# Altium schematic symbol library Inductor.SchLib: 46 symbols
Pins are listed as number, name and electrical type; pins without a type are passive.

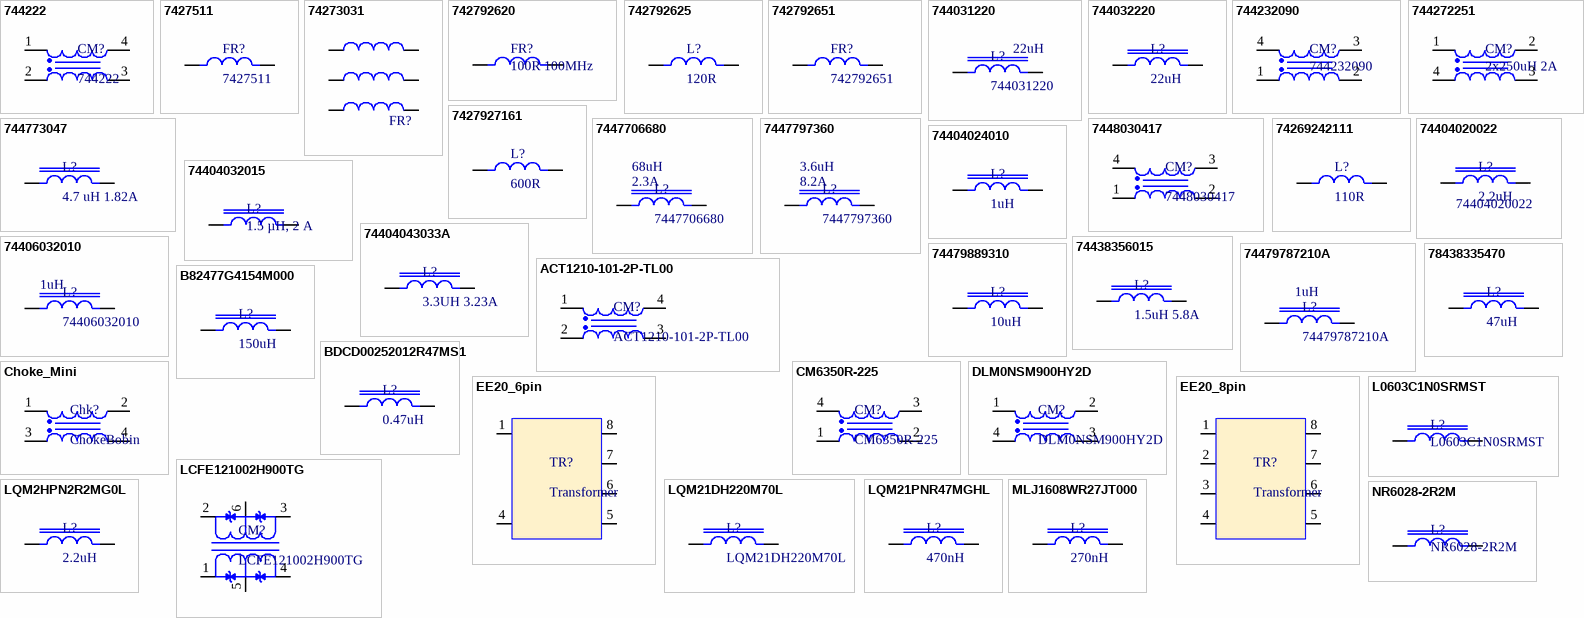
[diagram p0: symbols 744222 to NR6028-2R2M]

## 744222
designator CM?
Common Mode Chokes Dual 1000uH 6kOhm 100kHz 0.8A 0.207Ohm DCR SMD T/R Automotive AEC-Q200; Manufacturer: Wurth Elektronik; Current Rating: 800mA; DC Resistance (DCR): 310mΩ; Impedance: 6kΩ; Value: 1mH; Inductance Tolerance: 50%; Purpose Of Usage: BASIC; Shielding: Shielded; Manufacturer Part Number: 744222; RoHS: YES; Category: INDUCTORS; Ambient Temperature Range High: 85°C; Ambient Temperature Range Low: -40°C; Case/Package: SMD/SMT; Height: 5mm; Length: 9.2mm; Max DC Current: 800mA; Max Operating Temperature: 125°C; Min Operating Temperature: -40°C; Test Frequency: 100kHz; Mount: SMD; Stock ID: ??; Sub-Category: COMMON MODE CHOKES; Supplier 1: Digi-Key; Supplier Part Number 1: 732-1485-1-ND
footprint WE-SL2_74422 (SMD Inductor, Body 8.7x10mm)
pins: 1, 2, 3, 4

## 7427511
designator FR?
WE-SUKW SMT EMI SUPPRESSION 5-HOLE FERRITE BEAD Ferrite Bead, 3 Function(s), 5A, 2 Pin(s); Manufacturer: Wurth Electronics; Impedance: 416R; Max DC Current: 9A; Shielding: Unshielded; Test Frequency: 100MHz; DC Resistance (DCR): 1.1mR; Inductance Tolerance: 25%; Purpose Of Usage: BASIC; Manufacturer Part Number: 7427511; RoHS: YES; Category: INDUCTORS; Case/Package: 2220; Material: Steel; Min Operating Temperature: -55°C; Max Operating Temperature: 125°C; Max Current Rating: 5A; Series: WE-SUKW; Length: 4.6MM; Height: 4.6mm; Current Rating: 9A; Mount: SMD; MSL: 1; Resistor Type: Wirewound; Stock ID: ??; Sub-Category: FERRITE BEADS; Supplier 1: Digi-Key; Supplier Part Number 1: 732-2375-2-ND
footprint 7427511
pins: 1, 2

## 74273031
designator FR?, comment 264Ohm  (value not drawn)
WE-MLS Multiline EMI Suppression Ferrite, 3 Lines, 264Ohm, 4A; Manufacturer Part Number: 74273031; Manufacturer: Wurth Elektronik; DC Resistance (DCR): 2mR; Purpose Of Usage: BASIC; Inductance Tolerance: 20%; Category: INDUCTORS; Mount: THT; Length: 7.62mm; Height: 11.2mm; Case/Package: THT; Current Rating: 4A; Max DC Current: 4A; Max Operating Temperature: 125°C; Min Operating Temperature: -40°C; Resistor Type: Wirewound; RoHS: YES; Stock ID: ??; Sub-Category: FERRITE BEADS; Supplier 1: Digi-Key; Supplier Part Number 1: 732-74273031-ND
footprint 74273031 (THT Multiline EMI Suppression Ferrite, body 7.62x5.08mm)
pins: 1, 2, 3, 4, 5, 6

## 742792620
designator FR?, comment 100R 100MHz
100Ohm 100MHz 500mA 0603 SMD; Manufacturer: Wurth Electronics; Manufacturer Part Number: 742792620; DC Resistance (DCR): 150mR; Inductance Tolerance: 25%; Purpose Of Usage: BASIC; Supplier 1: Digi-Key; Supplier Part Number 1: 732-1579-1-ND; RoHS: YES; Mount: SMD; Case/Package: SMD/SMT; Min Operating Temperature: -55°C; Max Operating Temperature: 125°C; Current Rating: 500mA; Length: 1.6mm; Category: INDUCTORS; Sub-Category: FERRITE BEADS; Stock ID: ??
pins: 1, 2

## 742792625
designator L?, comment 120R
Ferrite Beads Multi-Layer 120Ohm 25% 100MHz 2A 50mOhm DCR 0603 T/R; Manufacturer: Wurth Electronics; Manufacturer Part Number: 742792625; Test Frequency: 400MHz; DC Resistance (DCR): 50mR; Purpose Of Usage: BASIC; Supplier 1: Digi-Key; RoHS: YES; Category: INDUCTORS; Stock 1: 126400; Case/Package: SMD/SMT; Material: Ferrite; Min Operating Temperature: -55°C; Max Operating Temperature: 125°C; Impedance: 120R; Max Current Rating: 2A; Max DC Current: 2A; Series: WE-CBF; Length: 1.6mm; Supplier Part Number 1: 732-4665-2-ND; Current Rating: 2A; Mount: SMD; Stock ID: ??; Sub-Category: FERRITE BEADS; Inductance Tolerance: 25%
footprint L0603
pins: 1, 2

## 742792651
designator FR?
Ferrite Beads WE-CBF 0603 SMD Bead 100MHz 600Ohm 1000mA; Manufacturer: Wurth Electronics; Current Rating: 1A; DC Resistance (DCR): 200mR; Value: 0.36H; Shielding: Unshielded; Purpose Of Usage: BASIC; Inductance Tolerance: 25%; Supplier 1: Digi-Key; Manufacturer Part Number: 742792651; RoHS: YES; Category: INDUCTORS; Stock 1: 668570; Case/Package: 0603; Min Operating Temperature: -55°C; Max Operating Temperature: 125°C; Max DC Current: 1A; Test Frequency: 100MHz; Series: WE-CBF; Length: 1.6mm; Supplier Part Number 1: 732-1593-2-ND; Mount: SMD; Stock ID: ??; Sub-Category: FERRITE BEADS
footprint L0603
pins: 1, 2

## 744031220
designator L?  value 22uH
Power Choke Shielded Wirewound 22uH 30% 100KHz Ferrite 510mA 450mOhm DCR T/R; Manufacturer: Wurth Electronics; DC Resistance (DCR): 450mR; Purpose Of Usage: BASIC; Supplier 1: Digi-Key; Manufacturer Part Number: 744031220; RoHS: YES; Category: INDUCTORS; Case/Package: 3816; Min Operating Temperature: -40°C; Max Operating Temperature: 125°C; Inductance Tolerance: 30%; Current Rating: 510mA; Shielding: Shielded; Length: 3.8mm; Supplier Part Number 1: 732-1012-2-ND; Stock ID: ??; Sub-Category: FIXED INDUCTORS; Mount: SMD; Local Supplier: Würth; Price 10K: 0.18
footprint WE-TPC_3816 (Power Inductor, SMD, 2-Leads, body 3.8x3.8mm)
pins: 1, 2

## 744032220
designator L?, comment 22uH
General Purpose Inductor, 22uH, 10%, 1 Element, Ferrite-Core, SMD, 1210; Manufacturer: Wurth Electronics; Manufacturer Part Number: 744032220; Purpose Of Usage: BASIC; RoHS: YES; Category: INDUCTORS; Case/Package: 1210; Local Supplier: Würth; Max Operating Temperature: 125°C; Min Operating Temperature: -40°C; Mount: SMD; Price 10K: 0.18; Stock ID: ??; Sub-Category: FIXED INDUCTORS; Supplier 1: Digi-Key; Supplier Part Number 1: 732-3058-1-ND; Value: 22uH
footprint WE-LQ_1210 (SMT Inductor, body 3.2x2.5mm)
pins: 1, 2

## 744232090
designator CM?
Common Mode Chokes Dual 90Ohm 100MHz 370mA SMD T/R; Manufacturer: Wurth Electronics; Value: 3.3H; DC Resistance (DCR): 300mR; Inductance Tolerance: 25%; Purpose Of Usage: BASIC; Supplier 1: Digi-Key; Supplier Part Number 1: 732-1469-1-ND; Manufacturer Part Number: 744232090; RoHS: YES; Mount: SMD; Case/Package: SMD/SMT; Min Operating Temperature: -40°C; Max Operating Temperature: 125°C; Current Rating: 370mA; Length: 3.2mm; Category: INDUCTORS; Sub-Category: COMMON MODE CHOKES; Stock ID: ??
footprint WE-CNSW_1206 (SMT Common Mode Line Filter, 4-leads, body 3.2x1.6mm)
pins: 1, 2, 3, 4

## 744272251
designator CM?, comment 2x250uH 2A
250 µH @ 100 kHz 2 Line Common Mode Choke Surface Mount 970 Ohms @ 15 MHz 2A DCR 35mOhm; Manufacturer: Wurth Electronics; Manufacturer Part Number: 744272251; Value: 250uH; DC Resistance (DCR): 35mR; Inductance Tolerance: 40%; Shielding: Yes; Purpose Of Usage: BASIC; Supplier 1: Digi-Key; Supplier Part Number 1: 732-1491-2-ND; RoHS: YES; Mount: SMD; Case/Package: SMD/SMT; Min Operating Temperature: -40°C; Max Operating Temperature: 125°C; Current Rating: 2A; Length: 10mm; Category: INDUCTORS; Sub-Category: COMMON MODE CHOKES; Stock ID: ??
footprint WE-SL5_L10W8.7H6.5 (SMD Inductor, Body 8.7x10mm)
pins: 1, 2, 3, 4

## 744773047
designator L?, comment 4.7 uH 1.82A
WE-PD2, Unshielded Wire-wound SMD Inductor With Ferrite Core, 4.7 Uh, 1.82A I; Manufacturer: Wurth Elektronik; Manufacturer Part Number: 744773047; DC Resistance (DCR): 59mΩ; Value: 4.7µH; Inductance Tolerance: 20%; Saturation Current: 2.9A; Self Resonant Frequency: 45MHz; Test Frequency: 10kHz; Purpose Of Usage: BASIC; RoHS: YES; Category: INDUCTORS; Case/Package: SMD/SMT; Current Rating: 1.82A; Height: 3.2mm; Length: 4mm; Max DC Current: 1.82A; Max Operating Temperature: 125°C; Min Operating Temperature: -40°C; RMS Current (Irms): 1.82A; Shielding: Unshielded; Mount: SMD; Stock ID: ??; Sub-Category: FIXED INDUCTORS; Supplier 1: Digi-Key; Supplier Part Number 1: 732-1252-1-ND
footprint WE-PD2_4532
pins: 1, 2

## 7427927161
designator L?, comment 600R
Ferrite Bead, 600R, 0.25A, 0402; Manufacturer: Wurth Electronics; Manufacturer Part Number: 7427927161; Current Rating: 250mA; DC Resistance (DCR): 560mR; Test Frequency: 100MHz; Purpose Of Usage: BASIC; Inductance Tolerance: 25%; Supplier 1: Digi-Key; RoHS: YES; Category: INDUCTORS; Stock 1: 40000; Case/Package: 0402; Min Operating Temperature: -55°C; Max Operating Temperature: 125°C; Max DC Current: 250mA; Series: WE-CBF; Length: 1mm; Supplier Part Number 1: 732-2387-2-ND; Mount: SMD; Stock ID: ??; Sub-Category: FERRITE BEADS
footprint L0402
pins: 1, 2

## 7447706680
designator L?  value 68uH  Current Rating: 2.3A
68 µH Shielded Inductor 2.3 A 97mOhm Max Nonstandard; Manufacturer: Wurth Electronics; Inductance Tolerance: 20%; DC Resistance (DCR): 97mR; Purpose Of Usage: BASIC; Supplier 1: Digi-Key; Manufacturer Part Number: 7447706680; RoHS: YES; Category: INDUCTORS; Case/Package: SMD/SMT; Min Operating Temperature: -40°C; Max Operating Temperature: 125°C; Shielding: Shielded; Length: 12mm; Supplier Part Number 1: 732-7447706680TR-ND; Mount: SMD; Stock ID: ??; Sub-Category: FIXED INDUCTORS
footprint WE-PD_1260P (SMT Shielded Power Inductor, 2-leads, body 12x12mm)
pins: 1, 2

## 7447797360
designator L?  value 3.6uH  Current Rating: 8.2A
WE-PDF SMT Shielded Power Inductor 3.6uH 8.2A; Manufacturer: Wurth Electronics; Inductance Tolerance: 20%; DC Resistance (DCR): 12.2mR; Purpose Of Usage: BASIC; Supplier 1: Digi-Key; Manufacturer Part Number: 7447797360; RoHS: YES; Category: INDUCTORS; Case/Package: SMD/SMT; Min Operating Temperature: -40°C; Max Operating Temperature: 125°C; Shielding: Shielded; Length: 0.102inch; Supplier Part Number 1: 732-2210-2-ND; Mount: SMD; Stock ID: ??; Sub-Category: FIXED INDUCTORS
footprint 7447797360
pins: 1, 2

## 7448030417
designator CM?
Common Mode Chokes Dual 17mH 10kHz 4A 50mOhm DCR Thru-Hole T/R; Manufacturer: Wurth Electronics; Shielding: Unshielded; Purpose Of Usage: BASIC; Inductance Tolerance: 50%; Manufacturer Part Number: 7448030417; RoHS: YES; Category: INDUCTORS; Case/Package: 300; Min Operating Temperature: -40°C; Max Operating Temperature: 125°C; Current Rating: 4A; Max Current Rating: 4A; Value: 17mH; Max DC Current: 4A; Test Frequency: 10kHz; Series: WE-CMBNC; Length: 22mm; Height: 25mm; Local Supplier: Würth; Mount: THT; Stock ID: ??; Sub-Category: COMMON MODE CHOKES; Supplier 1: Digi-Key; Supplier Part Number 1: 732-5582-ND
footprint WE-CMBNC_Type M_7448030417 (THT Common Mode Power Line Choke, 4 leads, body 23x13.5mm)
pins: 1, 2, 3, 4

## 74269242111
designator L?, comment 110R
Ferrite Bead, 0.09 Ohm, 1.2A, 0402;; Manufacturer: Wurth Electronics; Manufacturer Part Number: 74269242111; Purpose Of Usage: BASIC; Supplier 1: Digi-Key; RoHS: NO; Category: INDUCTORS; Stock 1: 18401; Supplier Part Number 1: 732-74269242111CT-ND; Case/Package: 0402; Mount: SMD; Stock ID: ??; Sub-Category: FERRITE BEADS
footprint L0402
pins: 1, 2

## 74404020022
designator L?, comment 2.2uH  Manufacturer Part Number: 74404020022
2.2uH 960MA 220 Mohm; Manufacturer: Wurth Electronics; Saturation Current: 1.4A; Shielding: Shielded; DC Resistance (DCR): 220mR; Self Resonant Frequency: 107MHz; Test Frequency: 1MHz; Purpose Of Usage: BASIC; Inductance Tolerance: 20%; Supplier 1: Digi-Key; RoHS: YES; Category: INDUCTORS; Stock 1: 789; Case/Package: Nonstandard; Min Operating Temperature: -40°C; Max Operating Temperature: 125°C; Resistor Type: Wirewound; Value: 2.2uH; Current Rating: 960mA; Supplier Part Number 1: 732-10741-6-ND; Mount: SMD; Stock ID: ??; Sub-Category: FIXED INDUCTORS
footprint WE-LQS_2010 (SMD Power Inductor, 2-Leads, body 2x1.6mm)
pins: 1, 2

## 74404024010
designator L?, comment 1uH
1uH 2.2A 37 Mohm SMD; Manufacturer: Wurth Electronics; Manufacturer Part Number: 74404024010; Inductance Tolerance: 20%; Saturation Current: 2.6A; Shielding: Shielded; DC Resistance (DCR): 37mR; Self Resonant Frequency: 159MHz; Test Frequency: 1MHz; Purpose Of Usage: BASIC; Supplier 1: Digi-Key; RoHS: YES; Category: INDUCTORS; Stock 1: 1070; Case/Package: Nonstandard; Min Operating Temperature: -40°C; Max Operating Temperature: 125°C; Resistor Type: Wirewound; Value: 1uH; Current Rating: 2.2A; RMS Current (Irms): 2.2A; Max DC Current: 2.2A; Series: WE-LQS; Length: 0.098inch; Supplier Part Number 1: 732-5425-6-ND; Mount: SMD; Stock ID: ??; Sub-Category: FIXED INDUCTORS; Local Supplier: Würth; Price 10K: 0.108
footprint WE-LQS_2512 (SMD Power Inductor, 2-Leads, body 2.5x2mm)
pins: 1, 2

## 74404032015
designator L?, comment 1.5 µH, 2 A
1.5 µH, 2 A, Semishielded, 2.3 A, 3mm x 3mm x 1.5mm; Manufacturer: Wurth Electronics; Manufacturer Part Number: 74404032015; Inductance Tolerance: 20%; Value: 1.5uH; Current Rating: 2A; DC Resistance (DCR): 40mR; Purpose Of Usage: BASIC; Supplier 1: Digi-Key; RoHS: YES; Mount: SMD; Case/Package: Nonstandard; Min Operating Temperature: -40°C; Max Operating Temperature: 125°C; Shielding: Shielded; Length: 0.118inch; Category: INDUCTORS; Supplier Part Number 1: 732-5492-1-ND; Sub-Category: FIXED INDUCTORS; Stock ID: ??
footprint WE-LQS SMT
pins: 1, 2

## 74404043033A
designator L?, comment 3.3UH 3.23A
3.3UH 3.23A 33 MOHM; Manufacturer: Wurth Electronics; Manufacturer Part Number: 74404043033A; Purpose Of Usage: BASIC; Supplier 1: Digi-Key; Supplier Part Number 1: 732-10755-1-ND; RoHS: NO; Category: INDUCTORS; Case/Package: Nonstandard; Value: 3.3uH; Mount: SMD; Sub-Category: FIXED INDUCTORS; Stock ID: ??
footprint WE-LQS_4025
pins: 1, 2

## 74406032010
designator L?  value 1uH
1 µH Shielded Drum Core, Wirewound Inductor 2.5 A 31mOhm Max Nonstandard; Manufacturer: Wurth Electronics; Saturation Current: 2.1A; DC Resistance (DCR): 31mR; Self Resonant Frequency: 264MHz; Test Frequency: 1MHz; Purpose Of Usage: BASIC; Inductance Tolerance: 20%; Current Rating: 2.5A; Supplier 1: Digi-Key; RoHS: YES; Category: INDUCTORS; Stock 1: 789; Case/Package: Nonstandard; Min Operating Temperature: -40°C; Max Operating Temperature: 125°C; Resistor Type: Wirewound; Shielding: Shielded; Supplier Part Number 1: 732-10794-2-ND; Mount: SMD; Stock ID: ??; Sub-Category: FIXED INDUCTORS; Manufacturer Part Number: 74406032010
footprint WE-LQFS_3818 (SMT Power Inductor, body 3.8x3.8mm)
pins: 1, 2

## 74438356015
designator L?, comment 1.5uH 5.8A
Fixed Ind 1.5UH 5.8A 19 Mohm SMD; Manufacturer: Wurth Electronics; Manufacturer Part Number: 74438356015; Saturation Current: 7.8A; Shielding: Shielded; DC Resistance (DCR): 19mR; Self Resonant Frequency: 48MHz; Test Frequency: 100kHz; Inductance Tolerance: 20%; Purpose Of Usage: BASIC; RoHS: YES; Category: INDUCTORS; Case/Package: Nonstandard; Min Operating Temperature: -40°C; Max Operating Temperature: 125°C; Value: 1.5uH; Current Rating: 5.8A; RMS Current (Irms): 5.8A; Series: WE-MAPI; Length: 0.161inch; Mount: SMD; Stock ID: ??; Sub-Category: FIXED INDUCTORS; Supplier 1: Digi-Key; Supplier Part Number 1: 732-8230-1-ND
footprint WE-MAPI_4020 (SMT Shielded Power Inductor, body 4.1x4.1mm)
pins: 1, 2

## 74479787210A
designator L?  value 1uH
WURTH ELEKTRONIK - 74479787210A - High Frequency Inductor, 1 &#181;H, WE-PMI Series, 1.7 A, 1008 [2516 Metric], Multilayer, 0.055 ohm; Manufacturer: Wurth Electronics; Inductance Tolerance: 20%; Current Rating: 1.7A; Shielding: Shielded; DC Resistance (DCR): 55mR; Purpose Of Usage: BASIC; Supplier 1: Digi-Key; Manufacturer Part Number: 74479787210A; RoHS: YES; Category: INDUCTORS; Case/Package: SMD/SMT; Min Operating Temperature: -40°C; Max Operating Temperature: 125°C; Length: 0.102inch; Supplier Part Number 1: 732-3436-1-ND; Mount: SMD; Stock ID: ??; Sub-Category: FIXED INDUCTORS
footprint WE-PMI_1008_L2.5W2H1 (Power Multilayer Inductor, body 2.5x2mm)
pins: 1, 2

## 74479889310
designator L?, comment 10uH
10uH, 500mA, 1008, 500mR; Manufacturer: Wurth Electronics; Manufacturer Part Number: 74479889310; Purpose Of Usage: BASIC; Inductance Tolerance: 20%; Supplier 1: Farnell; RoHS: YES; Category: INDUCTORS; Stock 1: 3000; Pricing 1: 100=1.12, 250=1.02, 500=0.896, 1500=0.845, 3000=0.801, 15000=0.775, 30000=0.727 (EUR); Supplier Part Number 1: 4065966RL; Case/Package: 1008; Current Rating: 500mA; DC Resistance (DCR): 500mR; Local Supplier: Würth; Max Operating Temperature: 125°C; Min Operating Temperature: -40°C; Mount: SMD; Price 10K: 0.108; Stock ID: ??; Sub-Category: FIXED INDUCTORS
footprint WE-PMI_1008_L2.5W2H1.2 (Power Multilayer Inductor, body 2.5x2mm)
pins: 1, 2

## 78438335470
designator L?, comment 47uH
Power Inductor, Aec-Q200, 47Uh, 0.39A Rohs Compliant: Yes |Wurth Elektronik 78438335470; Manufacturer: Wurth Electronics; Current Rating: 390mA; Saturation Current: 1.18A; Shielding: Shielded; DC Resistance (DCR): 2.3R; Self Resonant Frequency: 8MHz; Test Frequency: 100kHz; Inductance Tolerance: 20%; Purpose Of Usage: BASIC; Manufacturer Part Number: 78438335470; RoHS: YES; Category: Fixed Inductors; Case/Package: 1212; Min Operating Temperature: -40°C; Max Operating Temperature: 125°C; Value: 47uH; Series: WE-MAIA; RMS Current (Irms): 390mA; Length: 0.118inch; Height: 1.5mm; Mount: SMD; Stock ID: ??; Sub-Category: FIXED INDUCTORS; Supplier 1: Digi-Key; Supplier Part Number 1: 732-6947-2-ND
footprint WE-MAPI_3015
pins: 1, 2

## ACT1210-101-2P-TL00
designator CM?
ACT Series 1210 5100 Ohm 150 mA 1.5 Ohm DCR 80 V SMT Common Mode Filter; Manufacturer: TDK; Impedance: 5.1kR; Current Rating: 150mA; Value: 100uH; Shielding: Unshielded; Test Frequency: 10MHz; DC Resistance (DCR): 1500mR; Inductance Tolerance: 20%; Purpose Of Usage: BASIC; Manufacturer Part Number: ACT1210-101-2P-TL00; RoHS: YES; Category: INDUCTORS; Case/Package: 1210; Min Operating Temperature: -55°C; Max Operating Temperature: 150°C; Max Current Rating: 150mA; Max DC Current: 150mA; Series: ACT; Length: 3.2mm; Height: 2.5mm; Mount: SMD; MSL: 1; Stock ID: ??; Sub-Category: COMMON MODE CHOKES; Supplier 1: Digi-Key; Supplier Part Number 1: 445-172386-2-ND
footprint ACT1210 (SMT Common Mode Line Filter, 4-leads, body 3.2x1.6mm)
pins: 1, 2, 3, 4

## B82477G4154M000
designator L?, comment 150uH
Inductor Power Shielded Wirewound 150uH 20% 100KHz Ferrite 1.42A 0.225Ohm DCR T/R; Manufacturer: TDK EPCOS; Manufacturer Part Number: B82477G4154M000; DC Resistance (DCR): 225mR; Purpose Of Usage: BASIC; RoHS: YES; Category: INDUCTORS; Case/Package: Nonstandard; Current Rating: 1.42A; Inductance Tolerance: 20%; Local Supplier: TDK EPCOS; Max Operating Temperature: 125°C; Min Operating Temperature: -55°C; Mount: SMD; MSL: 1; Shielding: Shielded; Stock ID: ??; Sub-Category: FIXED INDUCTORS; Supplier 1: Digi-Key; Supplier Part Number 1: 495-5685-2-ND
footprint B82477G4104M000
pins: 1, 2

## BDCD00252012R47MS1
designator L?, comment 0.47uH
0.47uH, 4.4A, 1008, 39mR; Manufacturer: Pulse; Manufacturer Part Number: BDCD00252012R47MS1; Inductance Tolerance: 20%; Shielding: Shielded; Purpose Of Usage: BASIC; RoHS: YES; Case/Package: 1008; Category: INDUCTORS; Current Rating: 4.4A; DC Resistance (DCR): 39mR; Max Operating Temperature: 125°C; Min Operating Temperature: -40°C; Mount: SMD; Stock ID: ??; Sub-Category: FIXED INDUCTORS; Supplier 1: Digi-Key; Supplier Part Number 1: 553-BDCD00252012R47MS1CT-ND
footprint L1008 (Chip Inductor, 2-Leads, Body 2.50x2.00mm, IPC Medium Density)
pins: 1, 2

## Choke_Mini
designator Chk?, comment ChokeBobin
Purpose Of Usage: BASIC; Category: INDUCTORS; Case/Package: THT; Mount: THT; Sub-Category: COMMON MODE CHOKES; Stock ID: ??
footprint CHOKE_MINI
pins: 1, 2, 3, 4

## CM6350R-225
designator CM?
2.2mH @ 10kHz 2 Line Common Mode Choke Surface Mount 600mA DCR 300 mOhm; Manufacturer: API Delevan; Shielding: Unshielded; Current Rating: 0.6A; DC Resistance (DCR): 300mR; Inductance Tolerance: 20%; Purpose Of Usage: BASIC; Manufacturer Part Number: CM6350R-225; RoHS: YES; Category: INDUCTORS; Min Operating Temperature: -55°C; Max Operating Temperature: 105°C; Value: 2.2mH; Max DC Current: 600mA; Max Current Rating: 600mA; Series: CM6350R; Length: 0.36inch; Height: 0.21inch; Case/Package: Nonstandard; Mount: SMD; MSL: 1; Stock ID: ??; Sub-Category: COMMON MODE CHOKES; Supplier 1: Digi-Key; Supplier Part Number 1: DN42150-ND
footprint CM6350R
pins: 1, 2, 3, 4

## DLM0NSM900HY2D
designator CM?
Common Mode Chokes Dual 90Ohm 100MHz 0.1A 4.75Ohm DCR SMD T/R; Manufacturer: Murata; Value: 470nH; Purpose Of Usage: BASIC; Supplier 1: Digi-Key; Manufacturer Part Number: DLM0NSM900HY2D; RoHS: YES; Category: INDUCTORS; Supplier Part Number 1: 490-DLM0NSM900HY2DCT-ND; Case/Package: SMD; Mount: SMD; Stock ID: ??; Sub-Category: COMMON MODE CHOKES
footprint DLM0NSM900HY2D (Chip Array, Flat, 4-Leads, Pitch 0.50mm,  Body 0.85x0.65mm,  IPC Medium Density)
pins: 1, 2, 3, 4

## EE20_6pin
designator TR?, comment Transformer
Purpose Of Usage: BASIC; Category: INDUCTORS; Case/Package: THT; Mount: THT; Sub-Category: TRANSFORMER; Stock ID: ??
footprint EE20 6 pin
pins: 1, 4, 5, 6, 7, 8

## EE20_8pin
designator TR?, comment Transformer
Purpose Of Usage: BASIC; Category: INDUCTORS; Case/Package: THT; Mount: THT; Sub-Category: TRANSFORMER; Stock ID: ??
footprint EE20 8 pin
pins: 1, 2, 3, 4, 5, 6, 7, 8

## L0603C1N0SRMST
designator L?
1nH 300mA 0.3nH Fixed Inductors; Manufacturer: KEMET; Shielding: Unshielded; DC Resistance (DCR): 50mR; Inductance Tolerance: 20%; Purpose Of Usage: BASIC; Supplier 1: Digi-Key; Manufacturer Part Number: L0603C1N0SRMST; RoHS: YES; Mount: SMD; Case/Package: 0603; Min Operating Temperature: -40°C; Max Operating Temperature: 85°C; Current Rating: 300mA; Value: 1nH; Length: 0.063inch; Supplier Part Number 1: 399-9568-1-ND; Category: INDUCTORS; Sub-Category: FIXED INDUCTORS; Stock ID: ??
footprint L0805
pins: 1, 2

## LCFE121002H900TG
designator CM?
Common Mode Chokes Dual 90Ohm 100MHz 0.1A 6Ohm DCR SMD T/R; Manufacturer: Littelfuse; DC Resistance (DCR): 6R; Current Rating: 100mA; Inductance Tolerance: 20%; Purpose Of Usage: BASIC; Supplier 1: Digi-Key; Manufacturer Part Number: LCFE121002H900TG; RoHS: YES; Category: INDUCTORS; Min Operating Temperature: -40°C; Max Operating Temperature: 85°C; Supplier Part Number 1: F10198CT-ND; Case/Package: 1210; Mount: SMD; Stock ID: ??; Sub-Category: COMMON MODE CHOKES; Local Supplier: Future; Price 10K: 0.092
footprint LCFE121002H900TG
pins: 1, 2, 3, 4, 5, 6

## LQM2HPN2R2MG0L
designator L?, comment 2.2uH
2.2uH ,1.3A ,%20 ,1008; Manufacturer: Murata; Manufacturer Part Number: LQM2HPN2R2MG0L; Shielding: Shielded; DC Resistance (DCR): 80mR; Inductance Tolerance: 20%; Purpose Of Usage: BASIC; Supplier 1: Digi-Key; RoHS: YES; Category: INDUCTORS; Mount: SMD; Case/Package: 1008; Min Operating Temperature: -55°C; Max Operating Temperature: 125°C; Current Rating: 1.3A; Value: 2.2uH; Length: 2.5mm; Supplier Part Number 1: 490-5114-1-ND; Sub-Category: FIXED INDUCTORS; Stock ID: ??
footprint L1008 (Chip Inductor, 2-Leads, Body 2.50x0.90mm, IPC Medium Density)
pins: 1, 2

## LQM21DH220M70L
designator L?
Inductor Power Chip Shielded Multi-Layer 22uH 20% 1MHz Ferrite 0.22A 1.625Ohm DCR 0805 Automotive T/R; Manufacturer: Murata; Purpose Of Usage: BASIC; Supplier 1: Digi-Key; Manufacturer Part Number: LQM21DH220M70L; RoHS: YES; Category: INDUCTORS; Stock 1: 1903; Supplier Part Number 1: 490-18464-1-ND; Mount: SMD; Stock ID: ??; Sub-Category: FIXED INDUCTORS; Case/Package: 0805; Value: 22uH
footprint L0805
pins: 1, 2

## LQM21PNR47MGHL
designator L?, comment 470nH
470nH, 3.1A, 0805; Manufacturer: Murata; Manufacturer Part Number: LQM21PNR47MGHL; Shielding: Unshielded; DC Resistance (DCR): 50mR; Inductance Tolerance: 20%; Purpose Of Usage: BASIC; Supplier 1: Digi-Key; RoHS: YES; Category: INDUCTORS; Mount: SMD; Case/Package: 0805; Min Operating Temperature: -40°C; Max Operating Temperature: 85°C; Value: 470nH; Current Rating: 3.1A; Supplier Part Number 1: 490-17698-1-ND; Sub-Category: FIXED INDUCTORS; Stock ID: ??
footprint L0805
pins: 1, 2

## MLJ1608WR27JT000
designator L?, comment 270nH
Ind Chip Shielded Multi-Layer 270nH 5% 25MHz 25Q-Factor Ferrite 550mA 0603 Paper T/R; Manufacturer: TDK; Manufacturer Part Number: MLJ1608WR27JT000; Saturation Current: 650mA; DC Resistance (DCR): 286mR; Self Resonant Frequency: 260MHz; Purpose Of Usage: BASIC; Supplier 1: Digi-Key; RoHS: YES; Category: INDUCTORS; Stock 1: 4000; Case/Package: 0603; Min Operating Temperature: -55°C; Max Operating Temperature: 125°C; Value: 270nH; Current Rating: 550mA; Shielding: Shielded; Test Frequency: 25MHz; Length: 0.063inch; Supplier Part Number 1: 445-174189-2-ND; Mount: SMD; Stock ID: ??; Sub-Category: FIXED INDUCTORS; Inductance Tolerance: 5%
footprint L0603
pins: 1, 2

## NR6028-2R2M
designator L?
INDUCTOR POWER 2.2UH 6X6MM 4.2A SMD 30%; Manufacturer: COREMASTER; DC Resistance (DCR): 26mR; Purpose Of Usage: BASIC; Manufacturer Part Number: NR6028-2R2M; RoHS: NO; Mount: SMD; Inductance Tolerance: 30%; Value: 2.2uH; Supplier 1: OZDİSAN; Supplier Part Number 1: NR6028-2R2M; Category: INDUCTORS; Case/Package: Nonstandard; Sub-Category: FIXED INDUCTORS; Stock ID: ??; Local Supplier: OZDİSAN; Price 10K: 0.15
footprint NR6028-2R2M
pins: 1, 2

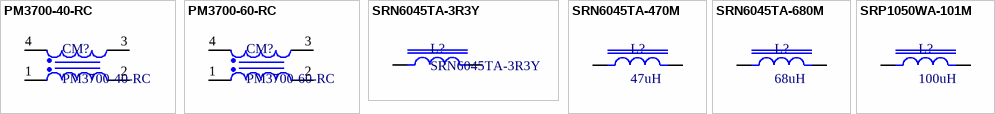
[diagram p1: symbols PM3700-40-RC to SRP1050WA-101M]

## PM3700-40-RC
designator CM?
PM3700-40-RC Common Mode Chokes Dual 1MH 1KHZ 4A 20MOHM Dcr SMD T/r Rohs; Manufacturer: Bourns; Shielding: Unshielded; DC Resistance (DCR): 20mR; Purpose Of Usage: BASIC; Inductance Tolerance: 20%; Manufacturer Part Number: PM3700-40-RC; RoHS: YES; Category: INDUCTORS; Case/Package: 3602; Min Operating Temperature: -55°C; Max Operating Temperature: 125°C; Current Rating: 4A; Value: 1mH; Max DC Current: 4A; Test Frequency: 1kHz; Series: PM3700; Max Current Rating: 4A; Length: 21.9mm; Height: 11.43mm; Mount: SMD; MSL: 1; Stock ID: ??; Sub-Category: COMMON MODE CHOKES; Supplier 1: Digi-Key; Supplier Part Number 1: PM3700-40-RCTR-ND
footprint PM3700
pins: 1, 2, 3, 4

## PM3700-60-RC
designator CM?
PM3700-60-RC Common Mode Chokes Dual 1MH 1KHZ 2A 20MOHM Dcr SMD T/r Rohs; Manufacturer: Bourns; Shielding: Unshielded; Value: 5mH; DC Resistance (DCR): 70mR; Purpose Of Usage: BASIC; Inductance Tolerance: 20%; Manufacturer Part Number: PM3700-60-RC; RoHS: YES; Category: INDUCTORS; Case/Package: 3602; Min Operating Temperature: -55°C; Max Operating Temperature: 125°C; Current Rating: 2A; Max DC Current: 2A; Test Frequency: 1kHz; Series: PM3700; Max Current Rating: 2A; Length: 21.9mm; Height: 11.43mm; Mount: SMD; MSL: 1; Stock ID: ??; Sub-Category: COMMON MODE CHOKES; Supplier 1: Digi-Key; Supplier Part Number 1: PM3700-60-RCTR-ND
footprint PM3700
pins: 1, 2, 3, 4

## SRN6045TA-3R3Y
designator L?
BOURNS - SRN6045TA-3R3Y - Power Inductor (SMD), 3.3 µH, 5 A, Semishielded, 7.8 A, SRN6045TA Series, 6mm x 6mm x 4.2mm; Inductance Tolerance: 30%; Value: 3.3uH; DC Resistance (DCR): 21mR; Purpose Of Usage: BASIC; Manufacturer: Bourns; Manufacturer Part Number: SRN6045TA-3R3Y; RoHS: NO; Mount: SMD; Supplier 1: Digi-Key; Supplier Part Number 1: SRN6045TA-3R3YCT-ND; Category: INDUCTORS; Case/Package: Nonstandard; Sub-Category: FIXED INDUCTORS; Stock ID: ??
footprint SRN6045TA
pins: 1, 2

## SRN6045TA-470M
designator L?, comment 47uH
47 µH Shielded Drum Core, Wirewound Inductor 0.7A 200mOhm Nonstandard; Manufacturer: Bourns; Manufacturer Part Number: SRN6045TA-470M; RMS Current (Irms): 1.6A; Saturation Current: 2A; DC Resistance (DCR): 200mR; Inductance Tolerance: 20%; Self Resonant Frequency: 10MHz; Test Frequency: 1MHz; Purpose Of Usage: BASIC; RoHS: YES; Category: INDUCTORS; Case/Package: Nonstandard; Min Operating Temperature: -55°C; Max Operating Temperature: 125°C; Value: 47uH; Series: SRN6045TA; Shielding: Shielded; Current Rating: 1.6A; Height: 4.5; Mount: SMD; MSL: 1; Price 10K: 0.8; Resistor Type: Wirewound; Stock ID: ??; Sub-Category: FIXED INDUCTORS; Supplier 1: Digi-Key; Supplier Part Number 1: SRN6045TA-470MTR-ND
footprint SRN6045TA
pins: 1, 2

## SRN6045TA-680M
designator L?, comment 68uH
68 µH Shielded Drum Core, Wirewound Inductor 1.1 A 305mOhm Nonstandard; Manufacturer: Bourns; Manufacturer Part Number: SRN6045TA-680M; RMS Current (Irms): 1.1A; Saturation Current: 1.6A; DC Resistance (DCR): 305mR; Inductance Tolerance: 20%; Self Resonant Frequency: 10MHz; Test Frequency: 1MHz; Purpose Of Usage: BASIC; RoHS: YES; Category: INDUCTORS; Case/Package: Nonstandard; Min Operating Temperature: -55°C; Max Operating Temperature: 125°C; Value: 68uH; Series: SRN6045TA; Shielding: Shielded; Current Rating: 1.1A; Height: 4.5; Mount: SMD; MSL: 1; Price 10K: 0.8; Resistor Type: Wirewound; Stock ID: ??; Sub-Category: FIXED INDUCTORS; Supplier 1: Digi-Key; Supplier Part Number 1: SRN6045TA-680MTR-ND
footprint SRN6045TA
pins: 1, 2

## SRP1050WA-101M
designator L?, comment 100uH
Ind, 11X10X5.1Mm, 100Uh, 2.7A, shd Rohs Compliant: Yes |Bourns SRP1050WA-101M; Manufacturer: Bourns; DC Resistance (DCR): 233mR; Inductance Tolerance: 20%; Purpose Of Usage: BASIC; Saturation Current: 4A; Shielding: Shielded; Manufacturer Part Number: SRP1050WA-101M; RoHS: YES; Case/Package: Nonstandard; Category: INDUCTORS; Current Rating: 2.7A; Max Operating Temperature: 165°C; Min Operating Temperature: -55°C; Mount: SMD; MSL: 1; RMS Current (Irms): 2.7A; Series: SRP1050WA; Stock ID: ??; Sub-Category: FIXED INDUCTORS; Supplier 1: Digi-Key; Supplier Part Number 1: 118-SRP1050WA-101MTR-ND; Value: 100uH
footprint SRP1050WA
pins: 1, 2